# Altium footprint library WE-VD.PcbLib: 120 footprints (part 8 of 8)
Each footprint in its own frame and in the unit in brackets; x right, y up, seen from the top. Pads: shape width x height; smd on the part's side, far side on the other; paste and mask are expansions set on the pad; w line width, h text height; cw(c..) or ccw(c..) is an arc to the next point about the centre after c.
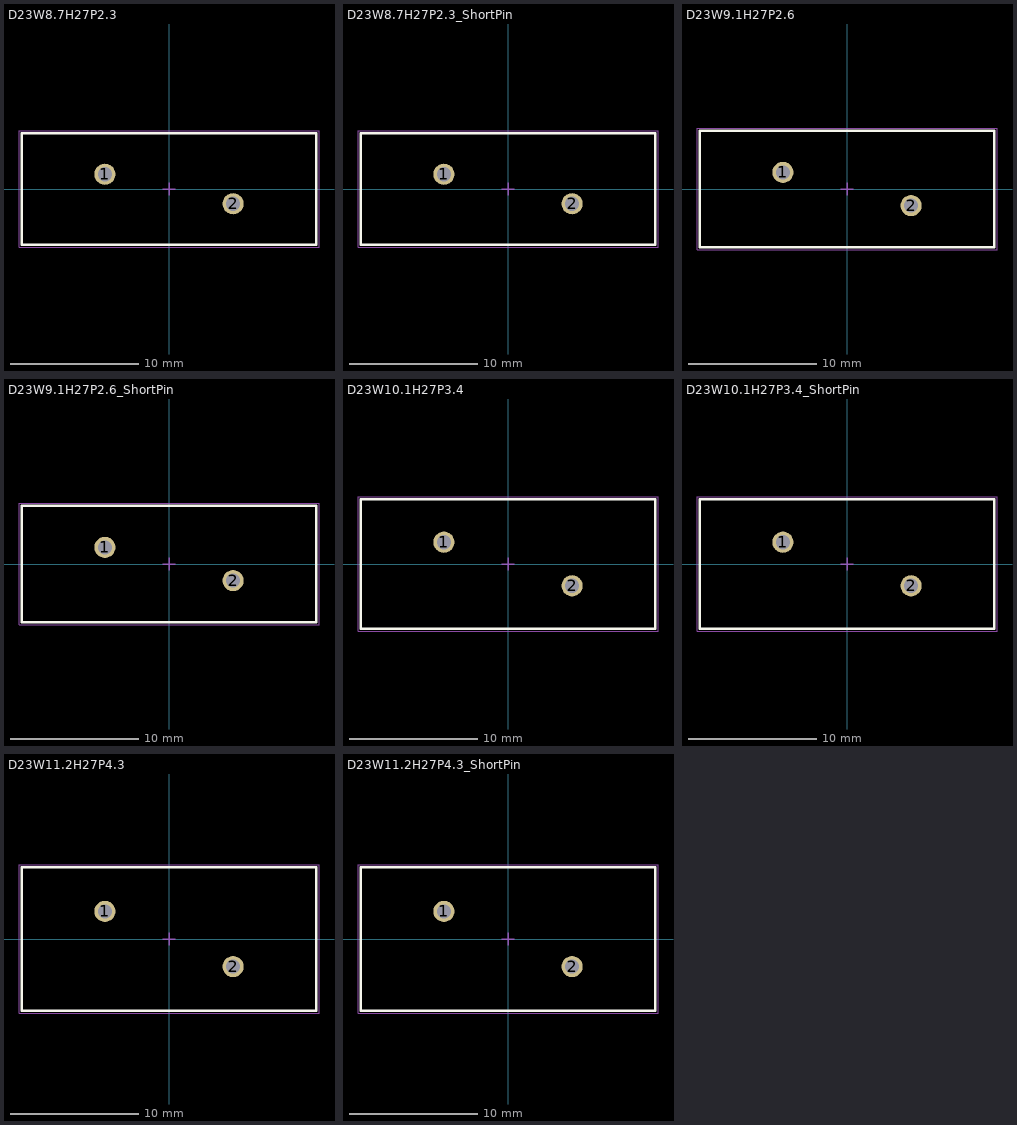
[diagram p7: the footprints below, top view; thin cyan lines are the x and y axes]

## D23W8.7H27P2.3 [mm] "Disk Varistor, Diameter 23mm, Width 8.7mm"
height 27
pads (2):
  round 1.65 hole 1.1: 1(-5,1.15) 2(5,-1.15)
Top Overlay:
  lines w0.2: -11.5,-4.35 11.5,-4.35 11.5,4.35 -11.5,4.35 -11.5,-4.35
Top Assembly:
  lines w0.1: -11.5,-4.35 -11.5,4.35 11.5,4.35 11.5,-4.35 -11.5,-4.35
Top Designator:
  text ".Designator" at -3.647,-0.357 h1
Top 3D Body:
  lines w0.1: -11.5,-4.35 -11.5,4.35 11.5,4.35 11.5,-4.35 -11.5,-4.35
Top Courtyard:
  lines w0.05: -11.7,-4.55 11.7,-4.55 11.7,4.55 -11.7,4.55 -11.7,-4.55
Top Component Center:
  lines w0.1: -0.5,0 0.5,0 ; 0,-0.5 0,0.5
3D body "820x24211x.stp": height 24, standoff -22.4, extent -10.694,-3.1 10.694,3.1

## D23W8.7H27P2.3_ShortPin [mm] "Disk Varistor, Diameter 23mm, Width 8.7mm"
height 27
pads (2):
  round 1.65 hole 1.1: 1(-5,1.15) 2(5,-1.15)
Top Overlay:
  lines w0.2: -11.5,-4.35 11.5,-4.35 11.5,4.35 -11.5,4.35 -11.5,-4.35
Top Assembly:
  lines w0.1: -11.5,-4.35 -11.5,4.35 11.5,4.35 11.5,-4.35 -11.5,-4.35
Top Designator:
  text ".Designator" at -3.647,-0.357 h1
Top 3D Body:
  lines w0.1: -11.5,-4.35 -11.5,4.35 11.5,4.35 11.5,-4.35 -11.5,-4.35
Top Courtyard:
  lines w0.05: -11.7,-4.55 11.7,-4.55 11.7,4.55 -11.7,4.55 -11.7,-4.55
Top Component Center:
  lines w0.1: -0.5,0 0.5,0 ; 0,-0.5 0,0.5
3D body "820524211B.stp": height 27, standoff -3.1, extent -11.5,-4.35 11.5,4.35

## D23W9.1H27P2.6 [mm] "Disk Varistor, Diameter 23mm, Width 9.1mm"
height 27
pads (2):
  round 1.65 hole 1.1: 1(-5,1.3) 2(5,-1.3)
Top Overlay:
  lines w0.2: -11.5,-4.55 11.5,-4.55 11.5,4.55 -11.5,4.55 -11.5,-4.55
Top Assembly:
  lines w0.1: -11.5,-4.55 -11.5,4.55 11.5,4.55 11.5,-4.55 -11.5,-4.55
Top Designator:
  text ".Designator" at -3.647,-0.357 h1
Top 3D Body:
  lines w0.1: -11.5,-4.55 -11.5,4.55 11.5,4.55 11.5,-4.55 -11.5,-4.55
Top Courtyard:
  lines w0.05: -11.7,-4.75 11.7,-4.75 11.7,4.75 -11.7,4.75 -11.7,-4.75
Top Component Center:
  lines w0.1: -0.5,0 0.5,0 ; 0,-0.5 0,0.5
3D body "820x24611.stp": height 24, standoff -22.4, extent -10.694,-3.25 10.694,3.25

## D23W9.1H27P2.6_ShortPin [mm] "Disk Varistor, Diameter 23mm, Width 9.1mm"
height 27
pads (2):
  round 1.65 hole 1.1: 1(-5,1.3) 2(5,-1.3)
Top Overlay:
  lines w0.2: -11.5,-4.55 -11.5,4.55 11.5,4.55 11.5,-4.55 -11.5,-4.55
Top Assembly:
  lines w0.1: -11.5,-4.55 11.5,-4.55 11.5,4.55 -11.5,4.55 -11.5,-4.55
Top Designator:
  text ".Designator" at -3.647,-0.357 h1
Top 3D Body:
  lines w0.1: -11.5,-4.55 11.5,-4.55 11.5,4.55 -11.5,4.55 -11.5,-4.55
Top Courtyard:
  lines w0.05: -11.7,-4.75 -11.7,4.75 11.7,4.75 11.7,-4.75 -11.7,-4.75
Top Component Center:
  lines w0.1: -0.5,0 0.5,0 ; 0,-0.5 0,0.5
3D body "820524611.stp": height 27, standoff -3.1, extent -11.5,-4.55 11.5,4.55

## D23W10.1H27P3.4 [mm] "Disk Varistor, Diameter 23mm, Width 10.1mm"
height 27
pads (2):
  round 1.65 hole 1.1: 1(-5,1.7) 2(5,-1.7)
Top Overlay:
  lines w0.2: -11.5,-5.05 -11.5,5.05 11.5,5.05 11.5,-5.05 -11.5,-5.05
Top Assembly:
  lines w0.1: -11.5,-5.05 11.5,-5.05 11.5,5.05 -11.5,5.05 -11.5,-5.05
Top Designator:
  text ".Designator" at -3.647,-0.357 h1
Top 3D Body:
  lines w0.1: -11.5,-5.05 11.5,-5.05 11.5,5.05 -11.5,5.05 -11.5,-5.05
Top Courtyard:
  lines w0.05: -11.7,-5.25 -11.7,5.25 11.7,5.25 11.7,-5.25 -11.7,-5.25
Top Component Center:
  lines w0.1: -0.5,0 0.5,0 ; 0,-0.5 0,0.5
3D body "820x25511.stp": height 24, standoff -22.4, extent -10.694,-3.65 10.694,3.65

## D23W10.1H27P3.4_ShortPin [mm] "Disk Varistor, Diameter 23mm, Width 10.1mm"
height 27
pads (2):
  round 1.65 hole 1.1: 1(-5,1.7) 2(5,-1.7)
Top Overlay:
  lines w0.2: -11.5,-5.05 -11.5,5.05 11.5,5.05 11.5,-5.05 -11.5,-5.05
Top Assembly:
  lines w0.1: -11.5,-5.05 11.5,-5.05 11.5,5.05 -11.5,5.05 -11.5,-5.05
Top Designator:
  text ".Designator" at -3.647,-0.357 h1
Top 3D Body:
  lines w0.1: -11.5,-5.05 11.5,-5.05 11.5,5.05 -11.5,5.05 -11.5,-5.05
Top Courtyard:
  lines w0.05: -11.7,-5.25 -11.7,5.25 11.7,5.25 11.7,-5.25 -11.7,-5.25
Top Component Center:
  lines w0.1: -0.5,0 0.5,0 ; 0,-0.5 0,0.5
3D body "820525511.stp": height 27, standoff -3.1, extent -11.5,-5.05 11.5,5.05

## D23W11.2H27P4.3 [mm] "Disk Varistor, Diameter 23mm, Width 11.2mm"
height 27
pads (2):
  round 1.65 hole 1.1: 1(-5,2.15) 2(5,-2.15)
Top Overlay:
  lines w0.2: -11.5,-5.6 11.5,-5.6 11.5,5.6 -11.5,5.6 -11.5,-5.6
Top Assembly:
  lines w0.1: -11.5,-5.6 -11.5,5.6 11.5,5.6 11.5,-5.6 -11.5,-5.6
Top Designator:
  text ".Designator" at -3.647,-0.357 h1
Top 3D Body:
  lines w0.1: -11.5,-5.6 -11.5,5.6 11.5,5.6 11.5,-5.6 -11.5,-5.6
Top Courtyard:
  lines w0.05: -11.7,-5.8 11.7,-5.8 11.7,5.8 -11.7,5.8 -11.7,-5.8
Top Component Center:
  lines w0.1: -0.5,0 0.5,0 ; 0,-0.5 0,0.5
3D body "820x26811.stp": height 24, standoff -22.4, extent -10.694,-4.1 10.694,4.1

## D23W11.2H27P4.3_ShortPin [mm] "Disk Varistor, Diameter 23mm, Width 11.2mm"
height 27
pads (2):
  round 1.65 hole 1.1: 1(-5,2.15) 2(5,-2.15)
Top Overlay:
  lines w0.2: -11.5,-5.6 11.5,-5.6 11.5,5.6 -11.5,5.6 -11.5,-5.6
Top Assembly:
  lines w0.1: -11.5,-5.6 -11.5,5.6 11.5,5.6 11.5,-5.6 -11.5,-5.6
Top Designator:
  text ".Designator" at -3.647,-0.357 h1
Top 3D Body:
  lines w0.1: -11.5,-5.6 -11.5,5.6 11.5,5.6 11.5,-5.6 -11.5,-5.6
Top Courtyard:
  lines w0.05: -11.7,-5.8 11.7,-5.8 11.7,5.8 -11.7,5.8 -11.7,-5.8
Top Component Center:
  lines w0.1: -0.5,0 0.5,0 ; 0,-0.5 0,0.5
3D body "820526811.stp": height 27.2, standoff -2.9, extent -11.5,-5.6 11.5,5.6